# Altium schematic symbol library VJ0402D100KXCAP.SchLib: 1 symbol
Pins are listed as number, name and electrical type; pins without a type are passive.

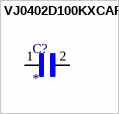
[diagram p0: symbol VJ0402D100KXCAP]

## VJ0402D100KXCAP
designator C?
MP: VJ0402D100KXCAP; Package: None; Price: None; Value: *; Availability: Unavailable
footprint CAPC1005X61N
pins: 1, 2